# Altium footprint library Screw.PcbLib: 17 footprints (part 2 of 2)
Each footprint in its own frame and in the unit in brackets; x right, y up, seen from the top. Pads: shape width x height; smd on the part's side, far side on the other; paste and mask are expansions set on the pad; w line width, h text height; cw(c..) or ccw(c..) is an arc to the next point about the centre after c.
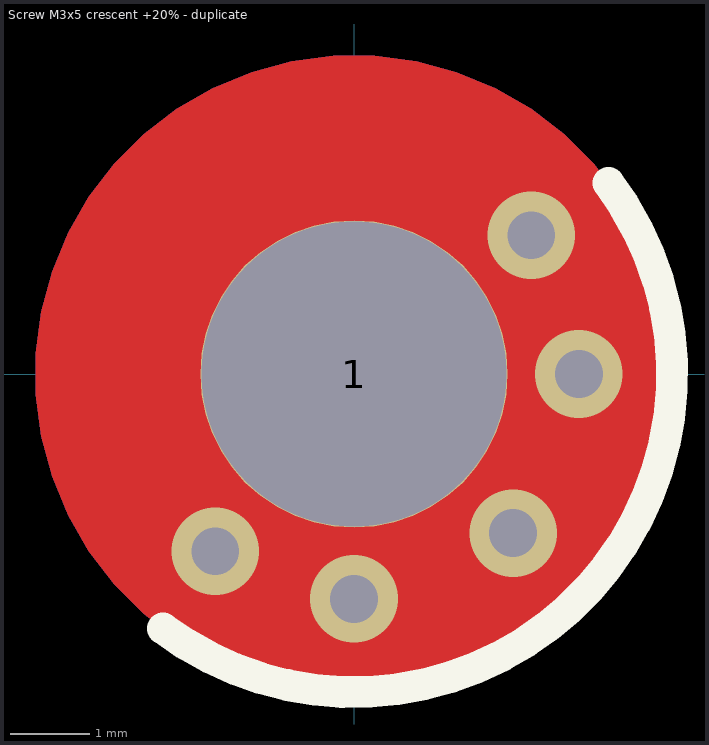
[diagram p1: the footprint, top view; thin cyan lines are the x and y axes]

## Screw M3x5 crescent +20% - duplicate [mm] "Hole 3.0mm"
height 10
pads (1):
  round 3.865 hole 3.84 mask+0.1: 1(0,0)
via 0,-2.828 diameter 1.1 hole 0.6
via 2,-2 diameter 1.1 hole 0.6
via 2.828,0 diameter 1.1 hole 0.6
via 2.227,1.744 diameter 1.1 hole 0.6
via -1.744,-2.227 diameter 1.1 hole 0.6
Top Layer:
  pour cut-out: 0,-4 -0.262,-4 -0.782,-3.932 -1.289,-3.796 -1.773,-3.595 -2.227,-3.333 -2.643,-3.014 -3.014,-2.643 -3.333,-2.227 -3.595,-1.773 -3.796,-1.289 -3.932,-0.782 -4,-0.262 -4,0 -4,0.262 -3.932,0.782 -3.796,1.289 -3.595,1.773 -3.333,2.227 -3.014,2.643 -2.643,3.014 -2.227,3.333 -1.773,3.595 -1.289,3.796 -0.782,3.932 -0.262,4 0,4 0.262,4 0.782,3.932 1.289,3.796 1.773,3.595 2.227,3.333 2.643,3.014 3.014,2.643 3.333,2.227 3.595,1.773 3.796,1.289 3.932,0.782 4,0.262 4,0 4,-0.262 3.932,-0.782 3.796,-1.289 3.595,-1.773 3.333,-2.227 3.014,-2.643 2.643,-3.014 2.227,-3.333 1.773,-3.595 1.289,-3.796 0.782,-3.932 0.262,-4
  region: 0,-3.6 -0.11,-3.603 -0.329,-3.595 -0.548,-3.572 -0.765,-3.535 -0.979,-3.484 -1.189,-3.419 -1.394,-3.341 -1.594,-3.249 -1.787,-3.145 -1.973,-3.028 -2.151,-2.899 -2.32,-2.759 -2.4,-2.683 -2.4,2.4 2.683,2.4 2.759,2.32 2.899,2.151 3.028,1.973 3.145,1.787 3.249,1.594 3.341,1.394 3.419,1.189 3.484,0.979 3.535,0.765 3.572,0.548 3.595,0.329 3.603,0.11 3.6,0 3.6,-0.118 3.585,-0.353 3.554,-0.587 3.508,-0.818 3.447,-1.046 3.371,-1.269 3.281,-1.487 3.177,-1.698 3.059,-1.902 2.928,-2.098 2.784,-2.285 2.629,-2.462 2.462,-2.629 2.285,-2.784 2.098,-2.928 1.902,-3.059 1.698,-3.177 1.487,-3.281 1.269,-3.371 1.046,-3.447 0.818,-3.508 0.587,-3.554 0.353,-3.585 0.118,-3.6
Bottom Layer:
  pour cut-out: 0,-4 -0.262,-4 -0.782,-3.932 -1.289,-3.796 -1.773,-3.595 -2.227,-3.333 -2.643,-3.014 -3.014,-2.643 -3.333,-2.227 -3.595,-1.773 -3.796,-1.289 -3.932,-0.782 -4,-0.262 -4,0 -4,0.262 -3.932,0.782 -3.796,1.289 -3.595,1.773 -3.333,2.227 -3.014,2.643 -2.643,3.014 -2.227,3.333 -1.773,3.595 -1.289,3.796 -0.782,3.932 -0.262,4 0,4 0.262,4 0.782,3.932 1.289,3.796 1.773,3.595 2.227,3.333 2.643,3.014 3.014,2.643 3.333,2.227 3.595,1.773 3.796,1.289 3.932,0.782 4,0.262 4,0 4,-0.262 3.932,-0.782 3.796,-1.289 3.595,-1.773 3.333,-2.227 3.014,-2.643 2.643,-3.014 2.227,-3.333 1.773,-3.595 1.289,-3.796 0.782,-3.932 0.262,-4
  region: 0,-3.6 -0.11,-3.603 -0.329,-3.595 -0.548,-3.572 -0.765,-3.535 -0.979,-3.484 -1.189,-3.419 -1.394,-3.341 -1.594,-3.249 -1.787,-3.145 -1.973,-3.028 -2.151,-2.899 -2.32,-2.759 -2.4,-2.683 -2.4,2.4 2.683,2.4 2.759,2.32 2.899,2.151 3.028,1.973 3.145,1.787 3.249,1.594 3.341,1.394 3.419,1.189 3.484,0.979 3.535,0.765 3.572,0.548 3.595,0.329 3.603,0.11 3.6,0 3.6,-0.118 3.585,-0.353 3.554,-0.587 3.508,-0.818 3.447,-1.046 3.371,-1.269 3.281,-1.487 3.177,-1.698 3.059,-1.902 2.928,-2.098 2.784,-2.285 2.629,-2.462 2.462,-2.629 2.285,-2.784 2.098,-2.928 1.902,-3.059 1.698,-3.177 1.487,-3.281 1.269,-3.371 1.046,-3.447 0.818,-3.508 0.587,-3.554 0.353,-3.585 0.118,-3.6
Top Overlay:
  lines w0.4: -2.4,-3.2 ccw(c0,0) 3.2,2.4
3D body "SCRW_CHSH_PHLIPS_M3X5.stp": height 2.53, standoff -4.8, extent -3,-3 3,3